# EAGLE library part TPS22919DCKR (library TPS22919DCKR)
5.5V, 1.5A, 90m self-protected load switch with controlled rise time Source: Datasheet <http://www.ti.com/lit/ds/symlink/tps22919.pdf>
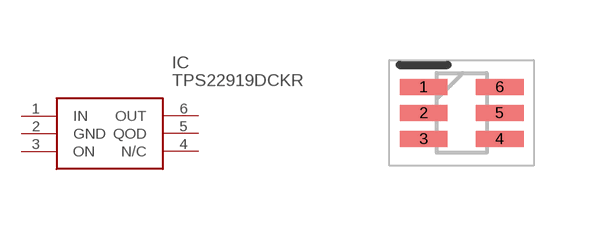
[diagram p0: symbol with the pads of SOT65P210X110-6N; footprint SOT65P210X110-6N]

Designator prefix IC

## TPS22919DCKR (Description: 5.5V, 1.5A, 90m self-protected load switch with controlled rise time; Height: 1.1mm; Manufacturer_Name: Texas Instruments; Manufacturer_Part_Number: TPS22919DCKR; Mouser_Part_Number: 595-TPS22919DCKR; Mouser_Price-Stock: https://www.mouser.co.uk/ProductDetail/Texas-Instruments/TPS22919DCKR?qs=byeeYqUIh0P8WJZpeizUqw%3D%3D)  [SOT65P210X110-6N]
1  IN
2  GND
3  ON
4  N/C  nc
5  QOD
6  OUT

## Footprint SOT65P210X110-6N (pad centres in mm)
TPS22919DCKR-1
smd 1.2 x 0.4: 1 -0.95,0.65; 2 -0.95,0; 3 -0.95,-0.65; 4 0.95,-0.65; 5 0.95,0; 6 0.95,0.65